# Altium schematic symbol library Diode_SMAJ5.0A.SchLib: 1 symbol
Pins are listed as number, name and electrical type; pins without a type are passive.

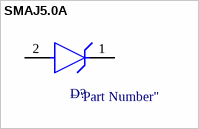
[diagram p0: symbol SMAJ5.0A]

## SMAJ5.0A
designator D?  (value not drawn)
pins: 1 C, 2 A